# EAGLE library part HMC349AMS8GE (library HMC349AMS8GE)
High Isolation, Nonreflective, GaAs, SPDT Switch,100 MHz to 4 GHz Source: Datasheet <https://www.analog.com/HMC349AMS8G/datasheet>
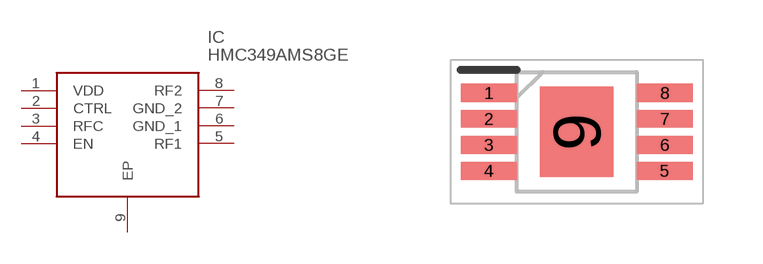
[diagram p0: symbol with the pads of SOP65P490X110-9N; footprint SOP65P490X110-9N]

Designator prefix IC

## HMC349AMS8GE (Description: High Isolation, Nonreflective, GaAs, SPDT Switch,100 MHz to 4 GHz; Height: 1.1mm; Manufacturer_Name: Analog Devices; Manufacturer_Part_Number: HMC349AMS8GE; Mouser_Part_Number: 584-HMC349AMS8GE; Mouser_Price-Stock: https://www.mouser.co.uk/ProductDetail/Analog-Devices/HMC349AMS8GE?qs=pceeu5JH%2FH9BjxXZlXR05g%3D%3D)  [SOP65P490X110-9N]
1  VDD
2  CTRL
3  RFC
4  EN
5  RF1
6  GND_1
7  GND_2
8  RF2
9  EP

## Footprint SOP65P490X110-9N (pad centres in mm)
(RH-8-1)
smd 1.4 x 0.45: 1 -2.2,0.975; 2 -2.2,0.325; 3 -2.2,-0.325; 4 -2.2,-0.975; 5 2.2,-0.975; 6 2.2,-0.325; 7 2.2,0.325; 8 2.2,0.975
smd 1.83 x 2.26: 9 0,0